# Altium footprint library CoilcraftPCB.PcbLib: 320 footprints (part 17 of 20)
Each footprint in its own frame and in the unit in brackets; x right, y up, seen from the top. Pads: shape width x height; smd on the part's side, far side on the other; paste and mask are expansions set on the pad; w line width, h text height; cw(c..) or ccw(c..) is an arc to the next point about the centre after c.
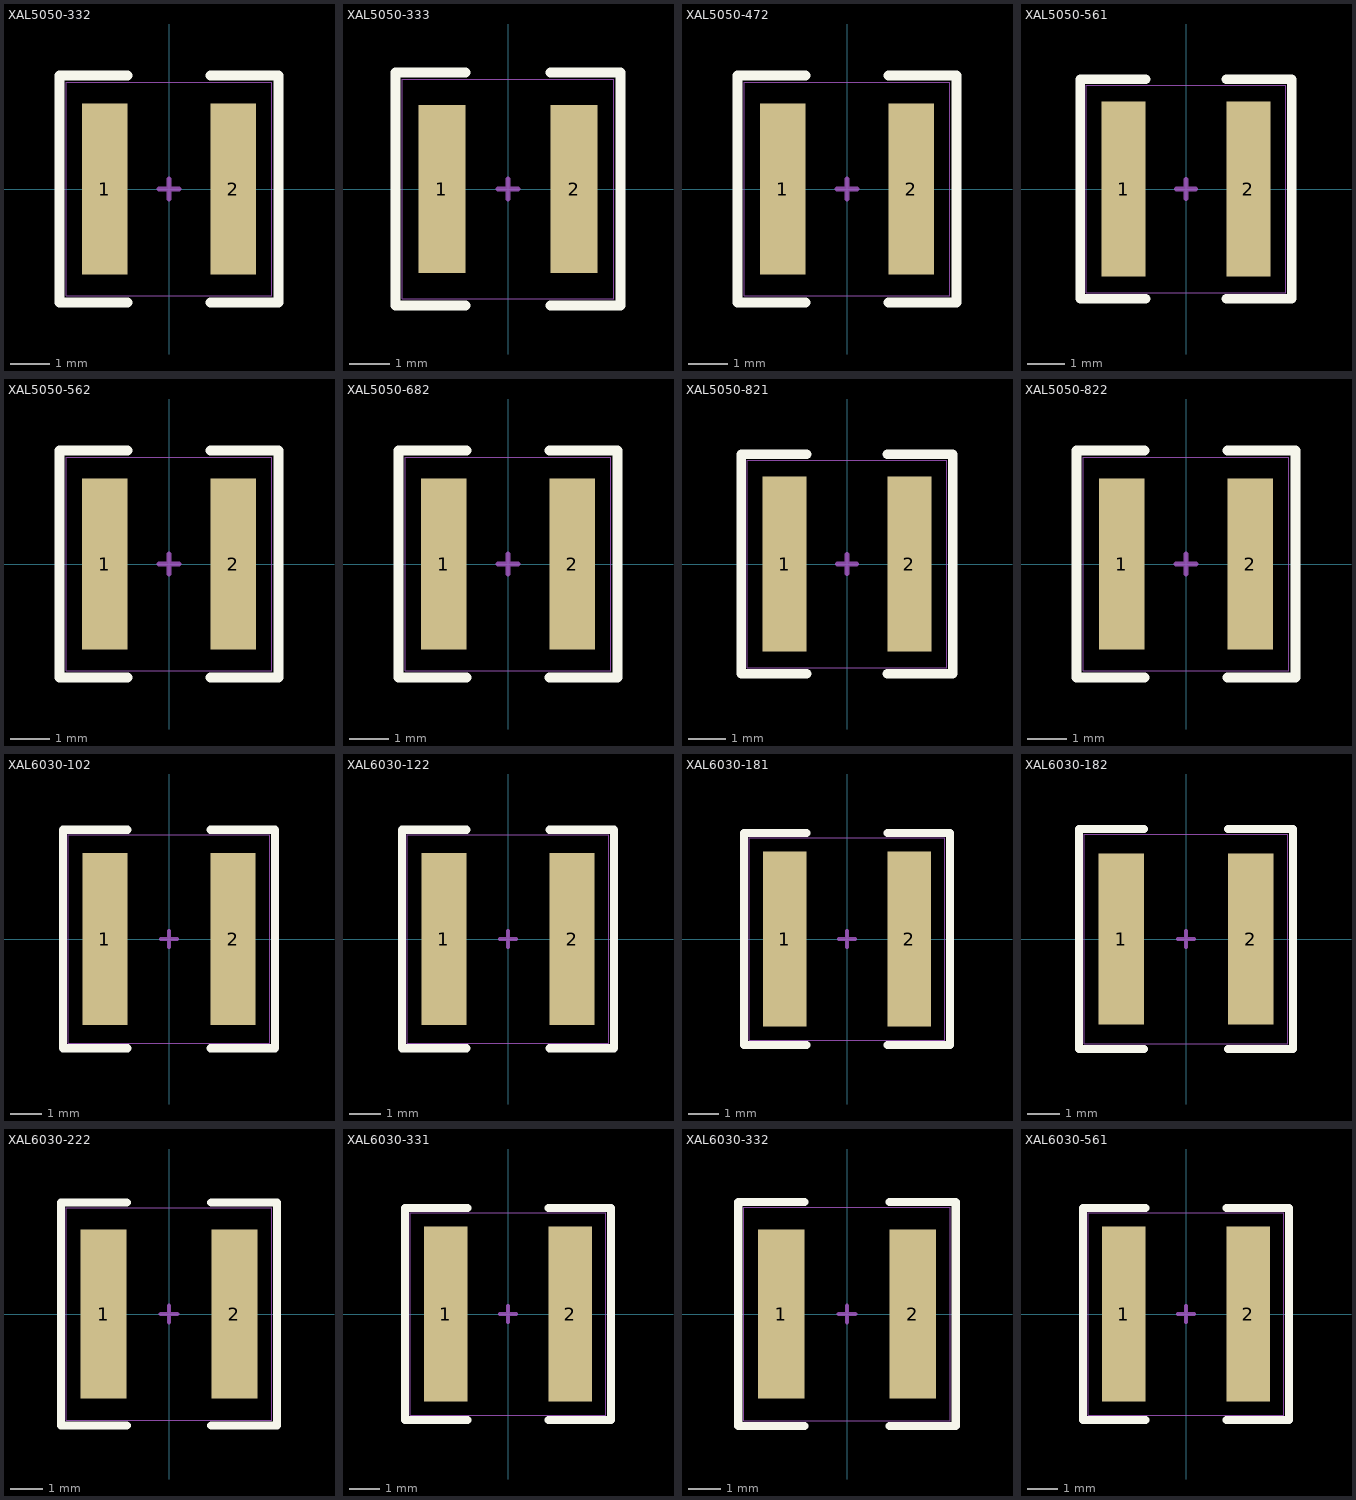
[diagram p16: the footprints below, top view; thin cyan lines are the x and y axes]

## XAL5050-332 [mil] "Coilcraft High Temperature Shielded Power Inductors"
height 201
pads (2):
  rect 46x173 smd: 1(-65,0) 2(65,0)
Top Overlay:
  lines w10: -42,-114.5 -110.5,-114.5 -110.5,114.5 -42,114.5 ; 42,-114.5 110.5,-114.5 110.5,114.5 42,114.5
Mechanical 13:
  lines w5: -10,0 10,0 ; 0,-10 0,10
Mechanical 14:
  lines w1: -104,-108 104,-108 104,108 -104,108 -104,-108
3D body: height 201, standoff 0, extent -104,-108 104,108

## XAL5050-333 [mil] "Coilcraft High Temperature Shielded Power Inductors"
height 201
pads (2):
  rect 46x165 smd: 1(-65,0) 2(65,0)
Top Overlay:
  lines w10: -42,-114.5 -110.5,-114.5 -110.5,114.5 -42,114.5 ; 42,-114.5 110.5,-114.5 110.5,114.5 42,114.5
Mechanical 13:
  lines w5: -10,0 10,0 ; 0,-10 0,10
Mechanical 14:
  lines w1: -104,-108 -104,108 104,108 104,-108 -104,-108
3D body: height 201, standoff 0, extent -104,-108 104,108

## XAL5050-472 [mil] "Coilcraft High Temperature Shielded Power Inductors"
height 201
pads (2):
  rect 46x173 smd: 1(-65,0) 2(65,0)
Top Overlay:
  lines w10: -42,-114.5 -110.5,-114.5 -110.5,114.5 -42,114.5 ; 42,-114.5 110.5,-114.5 110.5,114.5 42,114.5
Mechanical 13:
  lines w5: -10,0 10,0 ; 0,-10 0,10
Mechanical 14:
  lines w1: -104,-108 -104,108 104,108 104,-108 -104,-108
3D body: height 201, standoff 0, extent -104,-108 104,108

## XAL5050-561 [mil] "Coilcraft High Temperature Shielded Power Inductors"
height 201
pads (2):
  rect 46x183 smd: 1(-65,0) 2(65,0)
Top Overlay:
  lines w10: -42,-114.5 -110.5,-114.5 -110.5,114.5 -42,114.5 ; 42,-114.5 110.5,-114.5 110.5,114.5 42,114.5
Mechanical 13:
  lines w5: -10,0 10,0 ; 0,-10 0,10
Mechanical 14:
  lines w1: -104,-108 104,-108 104,108 -104,108 -104,-108
3D body: height 201, standoff 0, extent -104,-108 104,108

## XAL5050-562 [mil] "Coilcraft High Temperature Shielded Power Inductors"
height 201
pads (2):
  rect 46x173 smd: 1(-65,0) 2(65,0)
Top Overlay:
  lines w10: -42,-114.5 -110.5,-114.5 -110.5,114.5 -42,114.5 ; 42,-114.5 110.5,-114.5 110.5,114.5 42,114.5
Mechanical 13:
  lines w5: -10,0 10,0 ; 0,-10 0,10
Mechanical 14:
  lines w1: -104,-108 104,-108 104,108 -104,108 -104,-108
3D body: height 200.85, standoff 0.06, extent -107.88,-111.81 107.87,111.81

## XAL5050-682 [mil] "Coilcraft High Temperature Shielded Power Inductors"
height 201
pads (2):
  rect 46x173 smd: 1(-65,0) 2(65,0)
Top Overlay:
  lines w10: -42,-114.5 -110.5,-114.5 -110.5,114.5 -42,114.5 ; 42,-114.5 110.5,-114.5 110.5,114.5 42,114.5
Mechanical 13:
  lines w5: -10,0 10,0 ; 0,-10 0,10
Mechanical 14:
  lines w1: -104,-108 104,-108 104,108 -104,108 -104,-108
3D body: height 200.85, standoff 0.06, extent -107.88,-111.81 107.87,111.81

## XAL5050-821 [mil] "Coilcraft High Temperature Shielded Power Inductors"
height 201
pads (2):
  rect 46x183 smd: 1(-65,0) 2(65,0)
Top Overlay:
  lines w10: -42,-114.5 -110.5,-114.5 -110.5,114.5 -42,114.5 ; 42,-114.5 110.5,-114.5 110.5,114.5 42,114.5
Mechanical 13:
  lines w5: -10,0 10,0 ; 0,-10 0,10
Mechanical 14:
  lines w1: -104,-108 104,-108 104,108 -104,108 -104,-108
3D body: height 201, standoff 0, extent -104,-108 104,108

## XAL5050-822 [mil] "Coilcraft High Temperature Shielded Power Inductors"
height 201
pads (2):
  rect 46x173 smd: 1(-65,0) 2(65,0)
Top Overlay:
  lines w10: -42,-114.5 -110.5,-114.5 -110.5,114.5 -42,114.5 ; 42,-114.5 110.5,-114.5 110.5,114.5 42,114.5
Mechanical 13:
  lines w5: -10,0 10,0 ; 0,-10 0,10
Mechanical 14:
  lines w1: -104,-108 104,-108 104,108 -104,108 -104,-108
3D body: height 200.85, standoff 0.06, extent -107.88,-111.81 107.87,111.81

## XAL6030-102 [mil] "Coilcraft High Temperature Shielded Power Inductors"
height 122
pads (2):
  rect 56x213 smd: 1(-79.5,0) 2(79.5,0)
Top Overlay:
  lines w10: -51.5,-135.5 -131.5,-135.5 -131.5,135.5 -51.5,135.5 ; 51.5,-135.5 131.5,-135.5 131.5,135.5 51.5,135.5
Mechanical 13:
  lines w5: -10,0 10,0 ; 0,-10 0,10
Mechanical 14:
  lines w1: -125,-129 125,-129 125,129 -125,129 -125,-129
3D body: height 82.74, standoff 0.06, extent -129.14,-133.08 129.13,133.07

## XAL6030-122 [mil] "Coilcraft High Temperature Shielded Power Inductors"
height 122
pads (2):
  rect 56x213 smd: 1(-79.5,0) 2(79.5,0)
Top Overlay:
  lines w10: -51.5,-135.5 -131.5,-135.5 -131.5,135.5 -51.5,135.5 ; 51.5,-135.5 131.5,-135.5 131.5,135.5 51.5,135.5
Mechanical 13:
  lines w5: -10,0 10,0 ; 0,-10 0,10
Mechanical 14:
  lines w1: -125,-129 125,-129 125,129 -125,129 -125,-129
3D body: height 82.74, standoff 0.06, extent -129.14,-133.08 129.13,133.07

## XAL6030-181 [mil] "Coilcraft High Temperature Shielded Power Inductors"
height 122
pads (2):
  rect 56x224 smd: 1(-79.5,0) 2(79.5,0)
Top Overlay:
  lines w10: -51.5,-135.5 -131.5,-135.5 -131.5,135.5 -51.5,135.5 ; 51.5,-135.5 131.5,-135.5 131.5,135.5 51.5,135.5
Mechanical 13:
  lines w5: -10,0 10,0 ; 0,-10 0,10
Mechanical 14:
  lines w1: -125,-129 -125,129 125,129 125,-129 -125,-129
3D body: height 82.74, standoff 0.06, extent -129.14,-133.08 129.13,133.07

## XAL6030-182 [mil] "Coilcraft High Temperature Shielded Power Inductors"
height 122
pads (2):
  rect 56x210 smd: 1(-79.5,0) 2(79.5,0)
Top Overlay:
  lines w10: -51.5,-135.5 -131.5,-135.5 -131.5,135.5 -51.5,135.5 ; 51.5,-135.5 131.5,-135.5 131.5,135.5 51.5,135.5
Mechanical 13:
  lines w5: -10,0 10,0 ; 0,-10 0,10
Mechanical 14:
  lines w1: -125,-129 -125,129 125,129 125,-129 -125,-129
3D body: height 82.74, standoff 0.06, extent -129.14,-133.08 129.13,133.07

## XAL6030-222 [mil] "Coilcraft High Temperature Shielded Power Inductors"
height 122
pads (2):
  rect 56x206 smd: 1(-79.5,0) 2(79.5,0)
Top Overlay:
  lines w10: -51.5,-135.5 -131.5,-135.5 -131.5,135.5 -51.5,135.5 ; 51.5,-135.5 131.5,-135.5 131.5,135.5 51.5,135.5
Mechanical 13:
  lines w5: -10,0 10,0 ; 0,-10 0,10
Mechanical 14:
  lines w1: -125,-129 -125,129 125,129 125,-129 -125,-129
3D body: height 82.74, standoff 0.06, extent -129.14,-133.08 129.13,133.07

## XAL6030-331 [mil] "Coilcraft High Temperature Shielded Power Inductors"
height 122
pads (2):
  rect 56x224 smd: 1(-79.5,0) 2(79.5,0)
Top Overlay:
  lines w10: -51.5,-135.5 -131.5,-135.5 -131.5,135.5 -51.5,135.5 ; 51.5,-135.5 131.5,-135.5 131.5,135.5 51.5,135.5
Mechanical 13:
  lines w5: -10,0 10,0 ; 0,-10 0,10
Mechanical 14:
  lines w1: -125,-129 -125,129 125,129 125,-129 -125,-129
3D body: height 82.74, standoff 0.06, extent -129.14,-133.08 129.13,133.07

## XAL6030-332 [mil] "Coilcraft High Temperature Shielded Power Inductors"
height 122
pads (2):
  rect 56x204 smd: 1(-79.5,0) 2(79.5,0)
Top Overlay:
  lines w10: -51.5,-135.5 -131.5,-135.5 -131.5,135.5 -51.5,135.5 ; 51.5,-135.5 131.5,-135.5 131.5,135.5 51.5,135.5
Mechanical 13:
  lines w5: -10,0 10,0 ; 0,-10 0,10
Mechanical 14:
  lines w1: -125,-129 -125,129 125,129 125,-129 -125,-129
3D body: height 82.74, standoff 0.06, extent -129.14,-133.08 129.13,133.07

## XAL6030-561 [mil] "Coilcraft High Temperature Shielded Power Inductors"
height 122
pads (2):
  rect 56x224 smd: 1(-79.5,0) 2(79.5,0)
Top Overlay:
  lines w10: -51.5,-135.5 -131.5,-135.5 -131.5,135.5 -51.5,135.5 ; 51.5,-135.5 131.5,-135.5 131.5,135.5 51.5,135.5
Mechanical 13:
  lines w5: -10,0 10,0 ; 0,-10 0,10
Mechanical 14:
  lines w1: -125,-129 -125,129 125,129 125,-129 -125,-129
3D body: height 82.74, standoff 0.06, extent -129.14,-133.08 129.13,133.07